# Altium footprint library aeronist-Footprint-Lib.PcbLib: 67 footprints (part 1 of 5)
Each footprint in its own frame and in the unit in brackets; x right, y up, seen from the top. Pads: shape width x height; smd on the part's side, far side on the other; paste and mask are expansions set on the pad; w line width, h text height; cw(c..) or ccw(c..) is an arc to the next point about the centre after c.
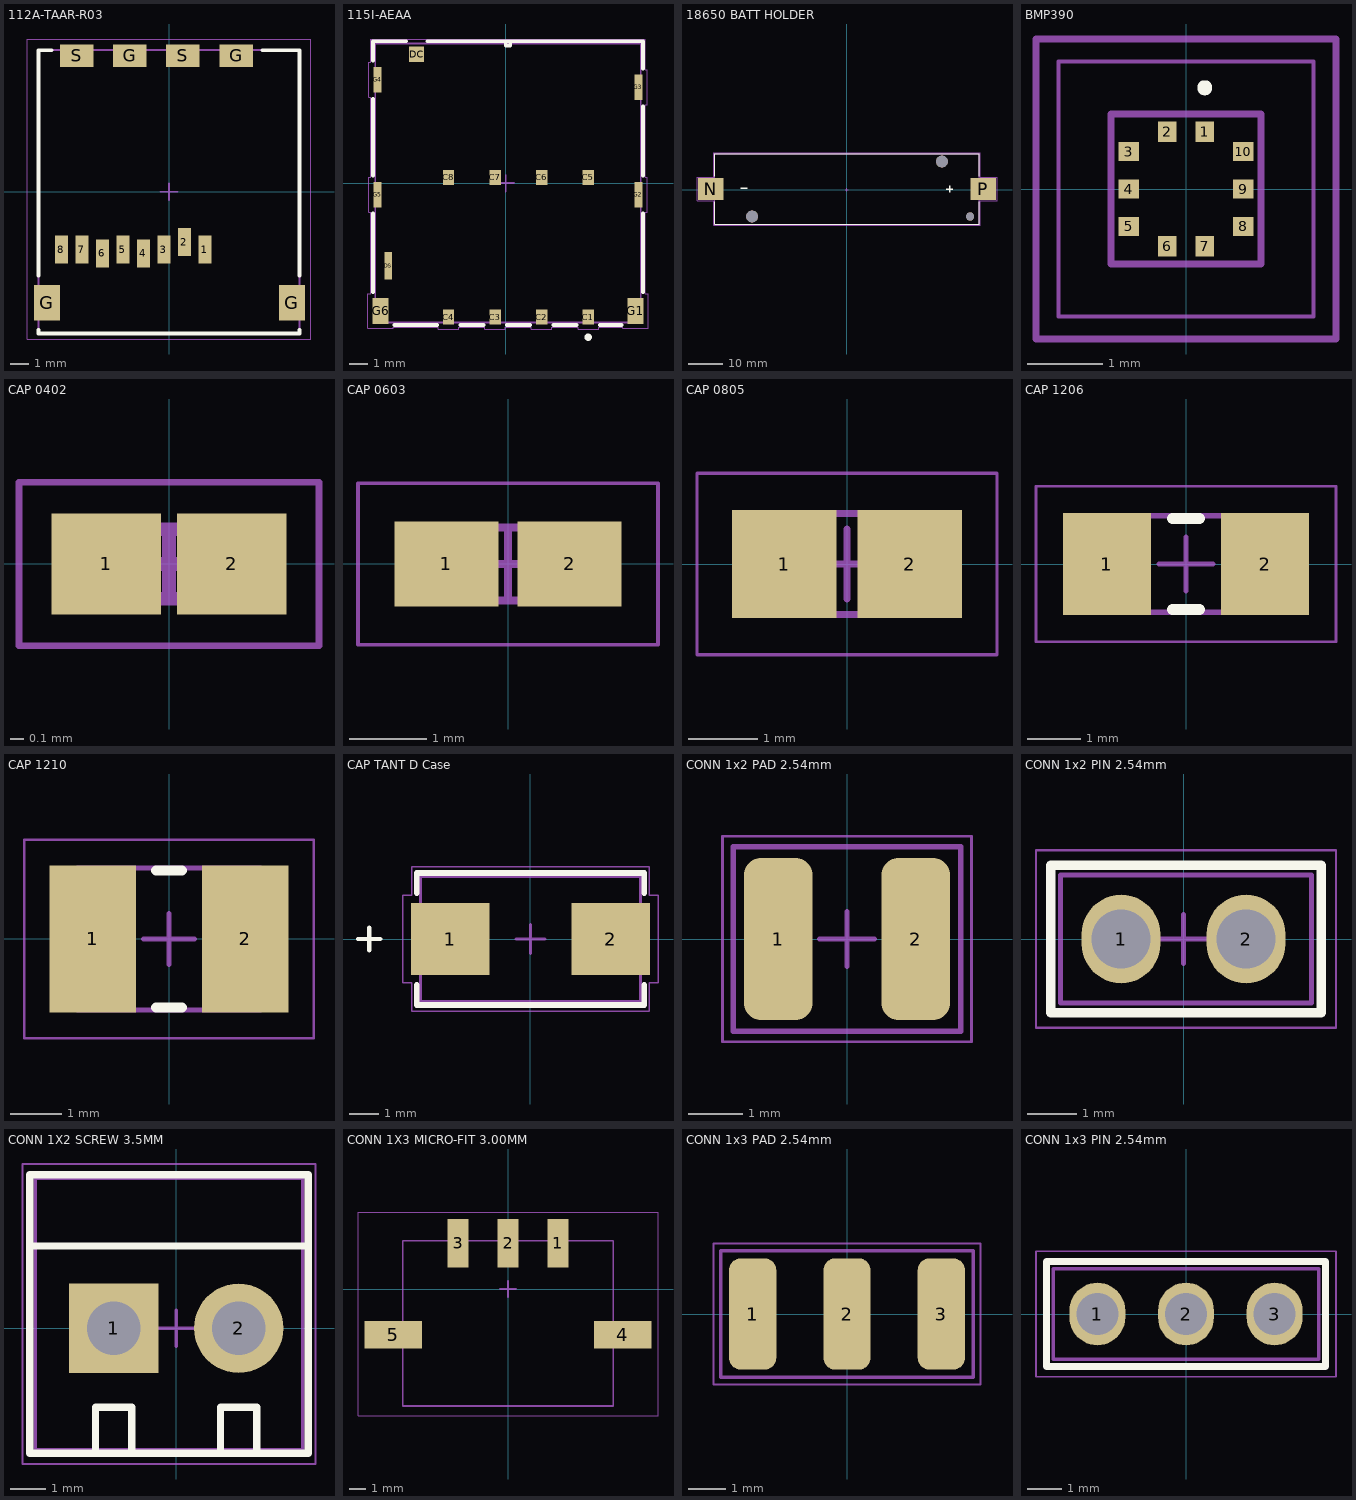
[diagram p0: the footprints below, top view; thin cyan lines are the x and y axes]

## 112A-TAAR-R03 [mm] "Right-angle microSD SMT, 9 pins (8 data + detection), card eject switch, 1.83 mm height."
pads (14):
  rect 0.7x1.5 smd: 1(1.92,-3.1) 2(0.82,-2.7) 3(-0.28,-3.1) 4(-1.38,-3.3) 5(-2.48,-3.1) 6(-3.58,-3.3) 7(-4.68,-3.1) 8(-5.78,-3.1)
  rect 1.4x1.9 smd: G(-6.55,-5.95) G(6.6,-5.95)
  rect 1.8x1.2 smd: G(-2.1,7.3) G(3.6,7.3) S(-4.95,7.3) S(0.75,7.3)
Top Overlay:
  lines w0.2: -7,-7.4 -7,-7.6 7,-7.6 7,-7.4 ; -7,-4.5 -7,7.6 -6.3,7.6 ; 5,7.6 7,7.6 7,-4.5
Top Assembly:
  lines w0.1: -7,-7.6 7,-7.6 7,7.6 -7,7.6 -7,-7.6
Top Courtyard:
  lines w0.05: -7.6,-7.9 7.6,-7.9 7.6,8.2 -7.6,8.2 -7.6,-7.9
  lines w0.1: -0.45,0 0.45,0 ; 0,-0.45 0,0.45
3D body "112A-TAAR-R03.STEP": height 2.2, standoff 0, extent -7,-7.7 7,7.5

## 115I-AEAA [mil] "6-pin right-angle SMD push-push Micro SIM card socket with gold-plated contacts"
pads (16):
  rect 24x32 smd paste+0 mask+0: C1(177.44,-287.51) C2(77.44,-287.51) C3(-22.56,-287.51) C4(-122.56,-287.51) C5(177.44,12.49) C6(77.44,12.49) C7(-22.56,12.49) C8(-122.56,12.49)
  rect 32x33 smd paste+0 mask+0: DC(-191.06,276.67)
  rect 16x59 smd paste+0 mask+0: DS(-252.48,-177.27)
  rect 34x55 smd paste-27.5 mask-27.5: G1(278.62,-274.52) G6(-268.62,-274.52)
  rect 17x55 smd paste-27.5 mask-27.5: G2(285.12,-24.52) G3(285.12,205.8) G4(-275.12,221.94) G5(-275.12,-24.52)
Top Overlay:
  circle w7.87: c177.17,-330.71 r3.94
  lines w6: 0,304.5 10,304.5
  lines w7.87: -285,-233.92 -285,-65.04 ; -285,16.01 -285,181.41 ; -285,262.47 -285,304.5 -213.63,304.5 ; -238.76,-304.5 -147.62,-304.5 ; -168.5,304.5 295,304.5 295,246.33 ; -97.5,-304.5 -47.62,-304.5 ; 0,304.5 0,295.28 10,295.28 10,304.5 ; 2.5,-304.5 52.38,-304.5 ; 102.5,-304.5 152.38,-304.5 ; 202.5,-304.5 248.76,-304.5 ; 295,-233.92 295,-65.04 ; 295,16.01 295,165.27
Top Assembly:
  lines w3.94: -280,-299.5 290,-299.5 290,299.5 -280,299.5 -280,-299.5
Top Courtyard:
  lines w1.97: -295.62,-312.02 -295.62,-237.02 -290,-237.02 -290,-62.02 -293.62,-62.02 -293.62,12.98 -290,12.98 -290,184.44 -293.62,184.44 -293.62,259.44 -290,259.44 -290,309.5 300,309.5 300,243.3 303.62,243.3 303.62,168.3 300,168.3 300,12.98 303.62,12.98 303.62,-62.02 300,-62.02 300,-237.02 305.62,-237.02 305.62,-312.02 251.62,-312.02 251.62,-309.5 199.44,-309.5 199.44,-313.51 155.44,-313.51 155.44,-309.5 99.44,-309.5 99.44,-313.51 55.44,-313.51 55.44,-309.5 -0.56,-309.5 -0.56,-313.51 -44.56,-313.51 -44.56,-309.5 -100.56,-309.5 -100.56,-313.51 -144.56,-313.51 -144.56,-309.5 -241.62,-309.5 -241.62,-312.02 -295.62,-312.02
  lines w3.94: -17.72,0 17.72,0 ; 0,-17.72 0,17.72
3D body "115I-AEAA.STEP": height 55.12, standoff 0, extent -285.04,-296.56 285.24,302.66

## 18650 BATT HOLDER [mm] "Footprint for 18650 Li-Ion battery holder snap-in contact, suitable for unpolarized 18650 cells."
pads (5):
  rect 7.46x6.47 smd: N(-39.543,0.254) P(39.797,0.254)
  round 3.45 hole 3.45 unplated: ""(-27.473,-7.746) ""(27.727,8.254)
  round 2.39 hole 2.39 unplated: ""(35.947,-7.746)
Top Overlay:
  lines w0.2: -38.398,-3.5 -38.398,-10.071 38.652,-10.071 38.652,-3.5 ; -38.398,4 -38.398,10.579 38.652,10.579 38.652,4
  lines w0.4: -30.75,0.5 -28.85,0.5 ; 29.05,0.25 30.95,0.25 ; 30,-0.7 30,1.2
Top Assembly:
  lines w0.1: -38.398,-10.071 38.652,-10.071 38.652,10.579 -38.398,10.579 -38.398,-10.071
Top Courtyard:
  lines w0.05: -43.523,-3.231 -43.523,3.739 -38.648,3.739 -38.648,10.829 38.902,10.829 38.902,3.739 43.777,3.739 43.777,-3.231 38.902,-3.231 38.902,-10.321 -38.648,-10.321 -38.648,-3.231 -43.523,-3.231
  lines w0.1: -0.45,0 0.45,0 ; 0,-0.45 0,0.45
3D body "step_temp.STEP": height 14.86, standoff -3.43, extent -43.104,-10.071 43.358,10.579

## BMP390 [mm] "LGA-10 footprint for Bosch BMP390 barometric pressure sensor, 2.0 × 2.0 × 0.75 mm package, 0.5 mm pitch"
pads (10):
  rect 0.25x0.275 smd: 1(0.25,0.763) 2(-0.25,0.763) 6(-0.25,-0.763) 7(0.25,-0.763)
  rect 0.275x0.25 smd: 3(-0.762,0.5) 4(-0.762,0) 5(-0.762,-0.5) 8(0.762,-0.5) 9(0.762,0) 10(0.762,0.5)
Top Overlay:
  lines w0.1: 0.25,1.3 ccw(c0.25,1.35) 0.25,1.4 ccw(c0.25,1.35) 0.25,1.3
Top Assembly:
  lines w0.1: -1,-1 -1,1 1,1 1,-1 -1,-1
Top Courtyard:
  lines w0.05: -1.7,-1.7 -1.7,1.7 1.7,1.7 1.7,-1.7 -1.7,-1.7
Mechanical 20:
  lines w0.1: -2,-2 -2,2 2,2 2,-2 -2,-2
3D body "BMP390.STEP": height 0.8, standoff 0, extent -1,-1 1,1

## CAP 0402 [mm] "Chip Capacitor, 2-Leads, Body 2,00x1,25mm, IPC Low Density"
height 0.51
pads (2):
  rect 0.8x0.74 smd: 1(-0.46,0) 2(0.46,0)
Top Assembly:
  lines w0.1: -0.525,-0.255 -0.525,0.255 0.525,0.255 0.525,-0.255 -0.525,-0.255
Top Courtyard:
  lines w0.05: -1.1,-0.6 -1.1,0.6 1.1,0.6 1.1,-0.6 -1.1,-0.6
  lines w0.1: -0.255,0 0.255,0 ; 0,-0.255 0,0.255
3D body "CAP 0402.step": height 0.51, standoff 0, extent -0.525,-0.255 0.525,0.255

## CAP 0603 [mm] "Chip Capacitor, 2-Leads, Body 1,60x0,80mm, IPC Low Density"
height 0.95
pads (2):
  rect 1.35x1.1 smd: 1(-0.8,0) 2(0.8,0)
Top Assembly:
  lines w0.1: -0.875,-0.475 -0.875,0.475 0.875,0.475 0.875,-0.475 -0.875,-0.475
Top Courtyard:
  lines w0.05: -1.95,-1.05 -1.95,1.05 1.95,1.05 1.95,-1.05 -1.95,-1.05
  lines w0.1: -0.475,0 0.475,0 ; 0,-0.475 0,0.475
3D body "CAP 0603.step": height 0.95, standoff 0, extent -0.875,-0.475 0.875,0.475

## CAP 0805 [mm] "Chip Capacitor, 2-Leads, Body 2,00x1,25mm, IPC Low Density"
height 1.45
pads (2):
  rect 1.5x1.55 smd: 1(-0.9,0) 2(0.9,0)
Top Assembly:
  lines w0.1: -1.1,-0.725 1.1,-0.725 1.1,0.725 -1.1,0.725 -1.1,-0.725
Top Courtyard:
  lines w0.05: -2.15,-1.3 2.15,-1.3 2.15,1.3 -2.15,1.3 -2.15,-1.3
  lines w0.1: -0.5,0 0.5,0 ; 0,-0.5 0,0.5
3D body "CAP 0805.step": height 1.45, standoff 0, extent -1.1,-0.725 1.1,0.725

## CAP 1206 [mm] "Chip Capacitor, 2-Leads, Body 3,20x1,60mm, IPC Low Density"
height 1.8
pads (2):
  rect 1.65x1.9 smd: 1(-1.475,0) 2(1.475,0)
Top Overlay:
  lines w0.2: -0.25,-0.85 0.25,-0.85 ; -0.25,0.85 0.25,0.85
Top Assembly:
  lines w0.1: -1.75,-0.9 -1.75,0.9 1.75,0.9 1.75,-0.9 -1.75,-0.9
Top Courtyard:
  lines w0.05: -2.8,-1.45 -2.8,1.45 2.8,1.45 2.8,-1.45 -2.8,-1.45
  lines w0.1: -0.5,0 0.5,0 ; 0,-0.5 0,0.5
3D body "CAP 1206.step": height 1.8, standoff 0, extent -1.75,-0.9 1.75,0.9

## CAP 1210 [mm] "Chip Capacitor, 2-Leads, Body 3,20x2,50mm, IPC Low Density"
height 2
pads (2):
  rect 1.7x2.9 smd: 1(-1.5,0) 2(1.5,0)
Top Overlay:
  lines w0.2: -0.25,-1.35 0.25,-1.35 ; -0.25,1.35 0.25,1.35
Top Assembly:
  lines w0.1: -1.8,-1.4 1.8,-1.4 1.8,1.4 -1.8,1.4 -1.8,-1.4
Top Courtyard:
  lines w0.05: -2.85,-1.95 -2.85,1.95 2.85,1.95 2.85,-1.95 -2.85,-1.95
  lines w0.1: -0.5,0 0.5,0 ; 0,-0.5 0,0.5
3D body "CAP 1210.step": height 2, standoff 0, extent -1.8,-1.4 1.8,1.4

## CAP TANT D Case [mm]
pads (2):
  rect 2.7x2.5 smd paste+0 mask+0: 1(-2.772,0) 2(2.772,0)
Top Overlay:
  lines w0.152: -5.951,0 -5.189,0 ; -5.57,-0.381 -5.57,0.381
  lines w0.2: -3.927,-1.583 -3.927,-2.277 3.927,-2.277 3.927,-1.583 ; -3.927,1.583 -3.927,2.277 3.927,2.277 3.927,1.583
Top Assembly:
  lines w0.1: -3.8,-2.15 3.8,-2.15 3.8,2.15 -3.8,2.15 -3.8,-2.15
Top Courtyard:
  lines w0.05: -4.4,-1.504 -4.1,-1.504 -4.1,-2.5 4.1,-2.5 4.1,-1.504 4.4,-1.504 4.4,1.504 4.1,1.504 4.1,2.5 -4.1,2.5 -4.1,1.504 -4.4,1.504 -4.4,-1.504
  lines w0.1: -0.5,0 0.5,0 ; 0,-0.5 0,0.5
Mechanical 13:
  lines w0.025: -5.951,0 -5.189,0 ; -5.57,-0.381 -5.57,0.381
3D body "CAPMP76X43_31N_KEM.step": height 3.15, standoff 0, extent -3.8,-2.15 3.8,2.15

## CONN 1x2 PAD 2.54mm [mm] "1×2 pad connector, 2.54 mm pitch."
pads (2):
  rrect50% 1.27x3 smd: 1(-1.27,0) 2(1.27,0)
Top Assembly:
  lines w0.1: -2.1,-1.7 -2.1,1.7 2.1,1.7 2.1,-1.7 -2.1,-1.7
Top Courtyard:
  lines w0.05: -2.3,-1.9 -2.3,1.9 2.3,1.9 2.3,-1.9 -2.3,-1.9
  lines w0.1: -0.5,0 0.5,0 ; 0,-0.5 0,0.5

## CONN 1x2 PIN 2.54mm [mm] "1×2 pin header connector, 2.54 mm pitch, through-hole."
pads (2):
  oval 1.6x1.8 hole 1.2: 1(-1.27,0) 2(1.27,0)
Top Overlay:
  lines w0.2: -2.7,-1.5 2.8,-1.5 2.8,1.5 -2.7,1.5 -2.7,-1.5
Top Assembly:
  lines w0.1: -2.5,-1.3 2.6,-1.3 2.6,1.3 -2.5,1.3 -2.5,-1.3
Top Courtyard:
  lines w0.05: -3,-1.8 -3,1.8 3.1,1.8 3.1,-1.8 -3,-1.8
  lines w0.1: -0.5,0 0.5,0 ; 0,-0.5 0,0.5
3D body "1x2THPitch 2_54mm.stp": height 9.2, standoff -3.5, extent -2.49,-1.27 2.59,1.27

## CONN 1X2 SCREW 3.5MM [mm] "1×2 screw terminal connector, 3.5 mm pitch, through-hole."
pads (2):
  rect 2.5x2.5 hole 1.5: 1(-1.75,0)
  round 2.5 hole 1.5: 2(1.75,0)
Top Overlay:
  lines w0.2: -4,2.3 3.6,2.3 ; -2.258,-3.48 -2.258,-2.21 -1.242,-2.21 -1.242,-3.48 ; 1.242,-3.48 1.242,-2.21 2.258,-2.21 2.258,-3.48 ; -4.1,-3.5 3.7,-3.5 3.7,4.3 -4.1,4.3 -4.1,-3.5
Top Assembly:
  lines w0.1: -3.95,-3.4 -3.95,4.2 3.55,4.2 3.55,-3.4 -3.95,-3.4
Top Courtyard:
  lines w0.05: -4.3,-3.8 -4.3,4.6 3.9,4.6 3.9,-3.8 -4.3,-3.8
  lines w0.1: -0.5,0 0.5,0 ; 0,-0.5 0,0.5
3D body "KF350.STEP": height 10, standoff -3.8, extent -3.897,-3.344 0.003,4.156
3D body "KF350.STEP": height 10, standoff -3.8, extent -0.397,-3.344 3.503,4.156

## CONN 1X3 MICRO-FIT 3.00MM [mm] "1×3 Micro Fit connector, 3.00 mm pitch."
pads (5):
  rect 1.27x2.92 smd: 1(3,2.735) 2(0,2.735) 3(-3,2.735)
  rect 3.43x1.65 smd: 4(6.885,-2.735) 5(-6.885,-2.735)
Top Assembly:
  lines w0.1: -6.325,-7.015 6.325,-7.015 6.325,2.885 -6.325,2.885 -6.325,-7.015
Top Courtyard:
  lines w0.05: -9,-7.6 9,-7.6 9,4.6 -9,4.6 -9,-7.6
  lines w0.1: -0.5,0 0.5,0 ; 0,-0.5 0,0.5
3D body "43650-0313.stp": height 5.69, standoff 0.01, extent -8.325,-7.35 8.325,3.39

## CONN 1x3 PAD 2.54mm [mm] "1×3 pad connector, 2.54 mm pitch."
pads (3):
  rrect50% 1.27x3 smd: 1(-2.54,0) 2(0,0) 3(2.54,0)
Top Assembly:
  lines w0.1: -3.4,-1.7 -3.4,1.7 3.4,1.7 3.4,-1.7 -3.4,-1.7
Top Courtyard:
  lines w0.05: -3.6,-1.9 -3.6,1.9 3.6,1.9 3.6,-1.9 -3.6,-1.9
  lines w0.1: -0.5,0 0.5,0 ; 0,-0.5 0,0.5

## CONN 1x3 PIN 2.54mm [mm] "1×3 pin header connector, 2.54 mm pitch, through-hole."
pads (3):
  oval 1.6x1.8 hole 1.2: 1(-2.54,0) 2(0,0) 3(2.54,0)
Top Overlay:
  lines w0.2: -4,-1.5 -4,1.5 4,1.5 4,-1.5 -4,-1.5
Top Assembly:
  lines w0.1: -3.8,-1.3 -3.8,1.3 3.8,1.3 3.8,-1.3 -3.8,-1.3
Top Courtyard:
  lines w0.05: -4.3,-1.8 4.3,-1.8 4.3,1.8 -4.3,1.8 -4.3,-1.8
  lines w0.1: -0.5,0 0.5,0 ; 0,-0.5 0,0.5
3D body "1x3THPitch 2_54mm.STEP": height 9.2, standoff -3.5, extent -3.81,-1.27 3.81,1.27